# Altium footprint library Connector.PcbLib: 272 footprints (part 8 of 17)
Each footprint in its own frame and in the unit in brackets; x right, y up, seen from the top. Pads: shape width x height; smd on the part's side, far side on the other; paste and mask are expansions set on the pad; w line width, h text height; cw(c..) or ccw(c..) is an arc to the next point about the centre after c.
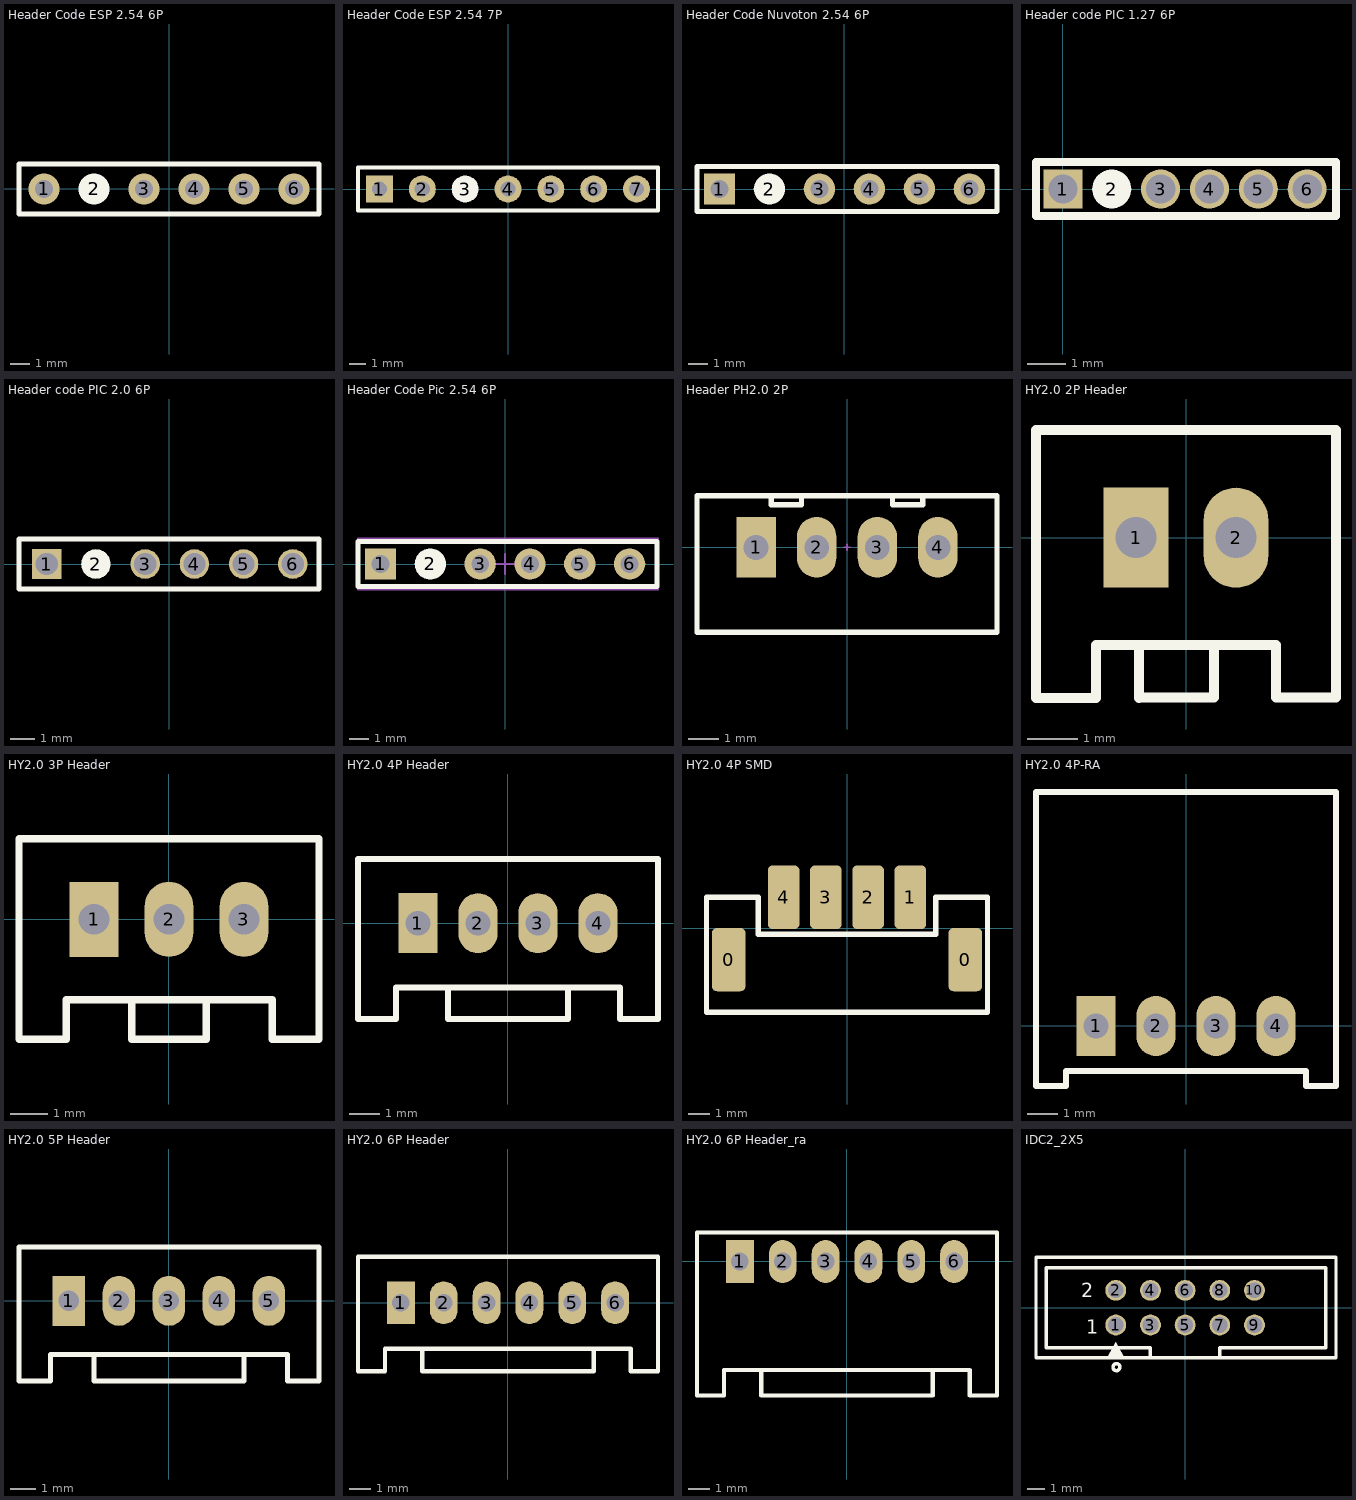
[diagram p7: the footprints below, top view; thin cyan lines are the x and y axes]

## Header Code ESP 2.54 6P [mm]
pads (6):
  round 1.6 hole 0.9: 1(-6.35,0) 3(-1.27,0) 4(1.27,0) 5(3.81,0) 6(6.35,0)
  round 1.6 on Top Overlay: 2(-3.81,0)
Top Overlay:
  lines w0.254: -7.62,-1.27 -7.62,1.27 7.62,1.27 7.62,-1.27 -7.62,-1.27
Top Designator:
  text ".Designator" at -3.71,-0.344 h1.52

## Header Code ESP 2.54 7P [mm]
pads (7):
  rect 1.6x1.6 hole 0.9: 1(-7.62,0)
  round 1.6 hole 0.9: 2(-5.08,0) 4(0,0) 5(2.54,0) 6(5.08,0) 7(7.62,0)
  round 1.6 on Top Overlay: 3(-2.54,0)
Top Overlay:
  lines w0.254: -8.89,-1.27 -8.89,1.27 8.89,1.27 8.89,-1.27 -8.89,-1.27
Top Designator:
  text ".Designator" at -3.71,-0.344 h1.52

## Header Code Nuvoton 2.54 6P [mm]
pads (6):
  rect 1.6x1.6 hole 0.9: 1(-6.35,0)
  round 1.6 on Top Overlay: 2(-3.81,0)
  round 1.6 hole 0.9: 3(-1.27,0) 4(1.27,0) 5(3.81,0) 6(6.35,0)
Top Overlay:
  lines w0.254: -7.493,-1.143 -7.493,1.143 7.75,1.143 7.75,-1.143 -7.493,-1.143
Top Designator:
  text ".Designator" at -3.582,-0.344 h1.52

## Header code PIC 1.27 6P [mil] "Connector; Header; 6 Position"
pads (6):
  rect 40x40 hole 30: 1(0,0)
  round 40 on Top Overlay: 2(50,0)
  round 40 hole 30: 3(100,0) 4(150,0) 5(200,0) 6(250,0)
Top Overlay:
  lines w7.87: -27.56,-27.56 279.53,-27.56 279.53,27.56 -27.56,27.56 -27.56,-27.56
Top Designator:
  text ".Designator" at -20.09,-13.54 h60

## Header code PIC 2.0 6P [mm]
pads (6):
  rect 1.2x1.2 hole 0.9: 1(-4.968,0)
  round 1.2 on Top Overlay: 2(-2.968,0)
  round 1.2 hole 0.9: 3(-0.968,0) 4(1.032,0) 5(3.032,0) 6(5.032,0)
Top Overlay:
  lines w0.2: -6.096,-1.016 -6.096,1.016 6.096,1.016 6.096,-1.016 -6.096,-1.016
Top Designator:
  text ".Designator" at -3.71,-0.344 h1.52

## Header Code Pic 2.54 6P [mm]
pads (6):
  rect 1.6x1.6 hole 0.9: 1(-6.35,0)
  round 1.6 on Top Overlay: 2(-3.81,0)
  round 1.6 hole 0.9: 3(-1.27,0) 4(1.27,0) 5(3.81,0) 6(6.35,0)
Top Overlay:
  lines w0.254: -7.493,-1.143 -7.493,1.143 7.75,1.143 7.75,-1.143 -7.493,-1.143
Top Designator:
  text ".Designator" at -3.582,-0.344 h1.52
Mechanical 15:
  lines w0.1: -0.5,0 0.5,0 ; 0,-0.5 0,0.5 ; -7.5,-1.3 -7.5,1.3 7.8,1.3 7.8,-1.3 -7.5,-1.3

## Header PH2.0 2P [mm] "CON2"
height 5.08
pads (4):
  rect 1.3x2 hole 0.82: 1(-3,0)
  oval 1.3x2 hole 0.82: 2(-1,0) 3(1,0) 4(3,0)
Top Overlay:
  lines w0.178: -2.5,1.7 -2.5,1.4 -1.5,1.4 -1.5,1.7 ; 1.5,1.7 1.5,1.4 2.5,1.4 2.5,1.7 ; -4.95,-2.8 4.95,-2.8 4.95,1.7 -4.95,1.7 -4.95,-2.8
Top Designator:
  text ".Designator" at -3.71,-0.894 h1.52
Mechanical 15:
  lines w0.051: -0.1,0 0.1,0 ; 0,-0.1 0,0.1
3D body "B2B-PH-K-S.step": height 6, standoff -3.4, extent -0.9,-2.8 5,1.7
3D body "B2B-PH-K-S.step": height 6, standoff -3.4, extent -4.9,-2.8 1,1.7

## HY2.0 2P Header [mm]
pads (2):
  rect 1.3x2 hole 0.82: 1(-1,0)
  oval 1.3x2 hole 0.82: 2(1,0)
Top Overlay:
  lines w0.2: -0.94,-2.15 -0.94,-3.2 0.56,-3.2 0.56,-2.15 ; 1.794,-2.15 -1.8,-2.15 -1.8,-3.2 -3,-3.2 -3,2.15 3,2.15 3,-3.2 1.8,-3.2 1.8,-2.15
Top Designator:
  text ".Designator" at -3.71,-0.869 h1.52
3D body "User Library-HY2_0 2P.sldprt": height 8, standoff -3.2, extent -3,-3.075 3,2.025

## HY2.0 3P Header [mm]
pads (3):
  rect 1.3x2 hole 0.82: 1(-2,0)
  oval 1.3x2 hole 0.82: 2(0,0) 3(2,0)
Top Overlay:
  lines w0.2: -1,-2.15 -1,-3.2 0.972,-3.2 ; 1,-3.2 1,-2.15 ; -4,-3.2 -4,2.15 4,2.15 4,-3.2 2.75,-3.2 2.75,-2.15 -2.737,-2.15 -2.737,-3.2 -4,-3.2
Top Designator:
  text ".Designator" at -3.71,-0.869 h1.52
3D body "User Library-HY2_0 3P.STEP": height 8, standoff -3.2, extent -4,-3.05 4,2.05

## HY2.0 4P Header [mm]
pads (4):
  rect 1.3x2 hole 0.82: 1(-3,0)
  oval 1.3x2 hole 0.82: 2(-1,0) 3(1,0) 4(3,0)
Top Overlay:
  lines w0.2: -2,-2.15 -2,-3.2 2,-3.2 2,-2.15 ; 5,-3.2 5,2.15 -5,2.15 -5,-3.2 -3.737,-3.2 -3.737,-2.15 3.731,-2.15 3.731,-3.2 5.001,-3.2
Top Designator:
  text ".Designator" at -3.71,-0.869 h1.52
3D body "User Library-HY2_0 4P.STEP": height 8, standoff -3.2, extent -5.023,-3.073 4.977,2.027

## HY2.0 4P SMD [mm]
pads (6):
  rrect30% 1.6x3 smd: 0(-5.6,-1.475) 0(5.6,-1.475)
  rrect30% 1.5x3 smd: 1(3,1.475) 2(1,1.475) 3(-1,1.475) 4(-3,1.475)
Top Overlay:
  lines w0.25: -6.65,-3.975 -6.65,1.475 -4.2,1.475 -4.2,-0.275 0,-0.275 4.2,-0.275 4.2,1.475 6.65,1.475 6.65,-3.975
  lines w0.254: -6.65,-3.975 6.65,-3.975

## HY2.0 4P-RA [mm]
pads (4):
  rect 1.3x2 hole 0.82: 1(-3,0)
  oval 1.3x2 hole 0.82: 2(-1,0) 3(1,0) 4(3,0)
Top Overlay:
  lines w0.2: -5,-2 -5,7.8 5,7.8 5,-2 4,-2 4,-1.5 -4,-1.5 -4,-2 -5,-2
Top Designator:
  text ".Designator" at -3.71,2.033 h1.52
3D body "User Library-HY2_0 4P.STEP": height 5.15, standoff 0.05, extent -5.023,-3.223 4.977,7.977

## HY2.0 5P Header [mm]
pads (5):
  rect 1.3x2 hole 0.82: 1(-4,0)
  oval 1.3x2 hole 0.82: 2(-2,0) 3(0,0) 4(2,0) 5(4,0)
Top Overlay:
  lines w0.2: -3,-2.15 -3,-3.2 3,-3.2 3,-2.15 ; 6,-3.2 6,2.15 -6,2.15 -6,-3.2 -4.737,-3.2 -4.737,-2.15 4.731,-2.15 4.731,-3.2 6.001,-3.2
Top Designator:
  text ".Designator" at -3.71,-0.869 h1.52
3D body "User Library-HY2_0 5P.STEP": height 8, standoff -3.2, extent -6,-3.067 6,2.033

## HY2.0 6P Header [mm]
pads (6):
  rect 1.3x2 hole 0.82: 1(-5,0)
  oval 1.3x2 hole 0.82: 2(-3,0) 3(-1,0) 4(1,0) 5(3,0) 6(5,0)
Top Overlay:
  lines w0.2: -4,-2.15 -4,-3.2 4,-3.2 4,-2.15 ; 7,-3.2 7,2.15 -7,2.15 -7,-3.2 -5.737,-3.2 -5.737,-2.15 5.731,-2.15 5.731,-3.2 7.001,-3.2
Top Designator:
  text ".Designator" at -3.71,-0.869 h1.52
3D body "User Library-HY2_0 6P.STEP": height 8, standoff -3.2, extent -6.978,-3.075 7.022,2.025

## HY2.0 6P Header_ra [mm]
pads (6):
  rect 1.3x2 hole 0.82: 1(-5,0)
  oval 1.3x2 hole 0.82: 2(-3,0) 3(-1,0) 4(1,0) 5(3,0) 6(5,0)
Top Overlay:
  lines w0.2: -4,-5.06 -4,-6.251 4,-6.251 4,-5.06 ; -7,-6.251 -7,1.349 7,1.349 7,-6.251 5.731,-6.251 5.731,-5.06 -5.737,-5.06 -5.737,-6.251 -7,-6.251
Top Designator:
  text ".Designator" at -3.71,-0.869 h1.52
3D body "S6B-PH-K-S.stp": height 4.6, standoff -3.4, extent -6.95,-6.251 6.95,1.349

## IDC2_2X5 [mm] "Connector; Header; 2mm Pitch"
pads (10):
  round 1.2 / inner round 1.2 / far side oval 1.2x1.6 hole 0.9: 1(-4,-1) 2(-4,1) 3(-2,-1) 4(-2,1) 5(0,-1) 6(0,1) 7(2,-1) 8(2,1) 9(4,-1) 10(4,1)
Top Overlay:
  circle w0.2: c-3.96,-3.43 r0.2
  region: -3.5,-2.9 -4,-2 -4.5,-2.9
  lines w0.2: -2,-2.9 -2,-2.3 -8,-2.3 -8,2.3 8.1,2.3 8.1,-2.3 2,-2.3 2,-2.9 ; -8.6,-2.9 -8.6,2.9 8.7,2.9 8.7,-2.9 -8.6,-2.9
  text "2" at -6,0.6 h0.8
  text "1" at -5.7,-1.5 h0.8
Top Designator:
  text ".Designator" at -3.66,-0.709 h1.52
3D body "header_awhw210g-0202.stp": height 5.85, standoff -2.7, extent -8.5,-2.75 8.5,2.75